# Altium footprint library KJ_Turret.PcbLib: 18 footprints (part 2 of 2)
Each footprint in its own frame and in the unit in brackets; x right, y up, seen from the top. Pads: shape width x height; smd on the part's side, far side on the other; paste and mask are expansions set on the pad; w line width, h text height; cw(c..) or ccw(c..) is an arc to the next point about the centre after c.
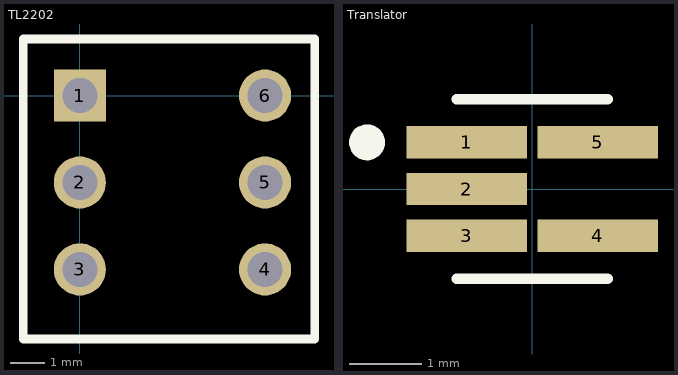
[diagram p1: the footprints below, top view; thin cyan lines are the x and y axes]

## TL2202 [mil]
pads (6):
  rect 60x60 hole 40: 1(0,0)
  round 60 hole 40: 2(0,-100) 3(0,-200) 4(213,-200) 5(213,-100) 6(213,0)
Top Overlay:
  lines w10: -65,-280 270,-280 270,65 -65,65 -65,-280
3D body "TL2202OAYB.step": height 559.68, standoff -137.17, extent -64.65,-281.37 270,65

## Translator [mm]
pads (5):
  rect 1.677x0.452 smd paste+0 mask+0: 1(-0.914,0.65) 2(-0.914,0) 3(-0.914,-0.65) 4(0.914,-0.65) 5(0.914,0.65)
Top Overlay:
  circle w0.25: c-2.302,0.65 r0.125
  lines w0.15: -1.05,-1.25 1.05,-1.25 ; -1.05,1.25 1.05,1.25